# Altium schematic symbol library MSASU32MSB7475MPNA01.SchLib: 1 symbol
Pins are listed as number, name and electrical type; pins without a type are passive.

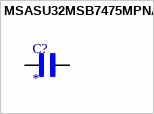
[diagram p0: symbol MSASU32MSB7475MPNA01]

## MSASU32MSB7475MPNA01
designator C?
MF: {'manufacturer': u'Taiyo Yuden'}; MP: MSASU32MSB7475MPNA01; Package: None; Price: None; Value: *; Availability: Unavailable
footprint CAPC3225X270N
pins: 1, 2